# Altium integrated library 5-1437565-0.IntLib: 1 symbol
Pins are listed as number, name and electrical type; pins without a type are passive.

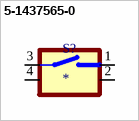
[diagram p0: symbol 5-1437565-0]

## 5-1437565-0
designator S?
Alcoswitch, Tactile switch,SMT,SPST,raised actuator | TE Connectivity FSM6JSMATR; SnapEDA_Link: https://www.snapeda.com/parts/FSM6JSMATR/TE+Connectivity+ALCOSWITCH+Switches/view-part/?ref=snap; Package: None; Value: *; MF: TE Connectivity; MP: FSM6JSMATR; Check_prices: https://www.snapeda.com/parts/FSM6JSMATR/TE+Connectivity+ALCOSWITCH+Switches/view-part/?ref=eda
footprint SW_5-1437565-0
pins: 1 2, 2, 3 1, 4 1